# Altium schematic symbol library SMBJ6P0CA-TR.SchLib: 1 symbol
Pins are listed as number, name and electrical type; pins without a type are passive.

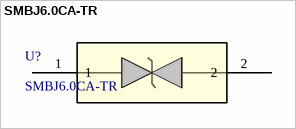
[diagram p0: symbol SMBJ6.0CA-TR]

## SMBJ6.0CA-TR
designator U?
600 W, 6 V TVS in SMB; Manufacturer_Name: STMicroelectronics; Copyright: Copyright (C) 2026 Ultra Librarian. All rights reserved.; Manufacturer_Part_Number: SMBJ6.0CA-TR; Datasheet: https://www.st.com/resource/en/datasheet/smbj58ca.pdf; RefDes: RefDes; Type: Type
footprint SMB_BI_STM
pins: 1, 2